# Altium footprint library SiPAP_Footprints.PcbLib: 25 footprints (part 2 of 2)
Each footprint in its own frame and in the unit in brackets; x right, y up, seen from the top. Pads: shape width x height; smd on the part's side, far side on the other; paste and mask are expansions set on the pad; w line width, h text height; cw(c..) or ccw(c..) is an arc to the next point about the centre after c.
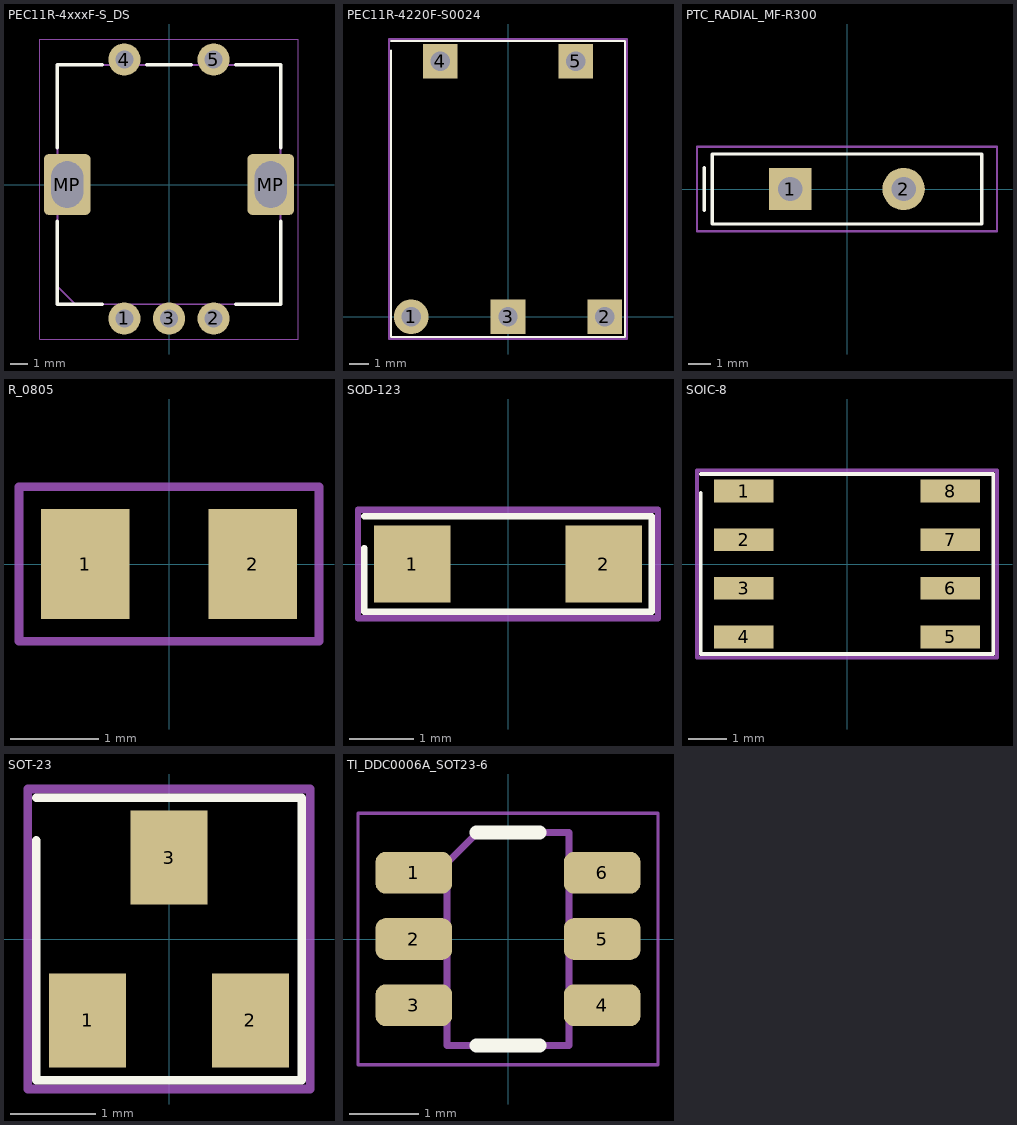
[diagram p1: the footprints below, top view; thin cyan lines are the x and y axes]

## PCBComponent_1 [mm]

## PEC11R-4xxxF-S_DS [mm] "Custom, 6 pads; custom lands, density N (nominal); from Bourns PEC11R Series 12 mm Incremental Encoder datasheet, PEC11R-4xxxF-Sxxxx recommended PCB layout, p. 2; Bourns PEC11R-4xxxF-Sxxxx PCB layout (datasheet p2). Origin = shaft centre. A-C-B 2.5mm pitch 7.5mm below, switch pins 7.0mm above, 2 plated mounting slots 1.8x2.6 (13.2 outer), pad MP = mechanical."
height 31.5
pads (7):
  round 1.8 hole 1: 1(-2.5,-7.5) 2(2.5,-7.5) 3(0,-7.5) 4(-2.5,7) 5(2.5,7)
  rrect19% 2.6x3.4 hole 1.8 slot 2.6 at 90 deg: MP(-5.7,0) MP(5.7,0)
Top Overlay:
  lines w0.2: -6.25,-2.05 -6.25,-6.7 -3.75,-6.7 ; -6.25,2.05 -6.25,6.7 -3.75,6.7 ; -1.25,6.7 1.25,6.7 ; 3.75,-6.7 6.25,-6.7 6.25,-2.05 ; 3.75,6.7 6.25,6.7 6.25,2.05
Mechanical 13:
  lines w0.1: -6.25,-5.7 -5.25,-6.7 6.25,-6.7 6.25,6.7 -6.25,6.7 -6.25,-5.7
  text ".Designator" at -5.075,-0.5 h1
Mechanical 15:
  lines w0.05: -7.25,-8.65 7.25,-8.65 7.25,8.15 -7.25,8.15 -7.25,-8.65
3D body: height 6.5, standoff 0, extent -6.25,-6.7 6.25,6.7
3D body: height 13.5, standoff 6.5, extent -3.5,-3.5 3.5,3.5
3D body: height 31.5, standoff 13.5, extent -3,-3 3,3

## PEC11R-4220F-S0024 [mm] "Bourns PEC11R-4xxxF-Sxxxx bottom view pad layout (Rev 04/26): A-C-B row 5mm pitch, switch pins 13.2mm offset, 7mm apart"
pads (5):
  round 1.8 on Top hole 1: 1(-5,0)
  rect 1.8x1.8 on Top hole 1: 2(5,0) 3(0,0) 4(-3.5,13.2) 5(3.5,13.2)
Top Overlay:
  lines w0.1: -6.05,13.75 -6.05,-1.05 6.05,-1.05 6.05,14.25 -6.05,14.25
Mechanical 15:
  lines w0.1: -6.15,-1.15 -6.15,14.35 6.15,14.35 6.15,-1.15 -6.15,-1.15

## PTC_RADIAL_MF-R300 [mm] "Bourns MF-R300 radial PPTC (datasheet p3: A 12.0 max, B 18.3 max tall, C 5.1 lead spacing, E 3.0 max, lead dia 0.81). Hole 1.1 mm."
pads (2):
  rect 1.905x1.905 hole 1.1: 1(-2.55,0)
  round 1.905 hole 1.1: 2(2.55,0)
Top Overlay:
  lines w0.152: -6.426,-0.953 -6.426,0.953 ; -6.071,-1.575 6.071,-1.575 6.071,1.575 -6.071,1.575 -6.071,-1.575
Mechanical 1:
  lines w0.102: -6.756,-1.905 6.756,-1.905 6.756,1.905 -6.756,1.905 -6.756,-1.905
3D body: height 24.8, standoff 0, extent -7.2,-1.5 7.2,1.5

## R_0805 [mm] "Standard 0805 SMD chip resistor land pattern (IPC nominal)"
pads (2):
  rect 1x1.25 smd: 1(-0.95,0) 2(0.95,0)
Mechanical 15:
  lines w0.1: -1.7,-0.875 -1.7,0.875 1.7,0.875 1.7,-0.875 -1.7,-0.875
3D body: height 1.25, standoff 0, extent -1,-0.625 1,0.625

## SOD-123 [mm] "Standard SOD-123 diode package, 2-pin (D1 reverse polarity protect)"
pads (2):
  rect 1.2x1.2 smd: 1(-1.5,0) 2(1.5,0)
Top Overlay:
  lines w0.1: -2.25,0.25 -2.25,-0.75 2.25,-0.75 2.25,0.75 -2.25,0.75
Mechanical 15:
  lines w0.1: -2.35,-0.85 -2.35,0.85 2.35,0.85 2.35,-0.85 -2.35,-0.85

## SOIC-8 [mm] "Standard SOIC-8, 1.27mm pitch, 3.9mm body (LM393 comparator)"
pads (8):
  rect 1.55x0.6 smd: 1(-2.7,1.905) 2(-2.7,0.635) 3(-2.7,-0.635) 4(-2.7,-1.905) 5(2.7,-1.905) 6(2.7,-0.635) 7(2.7,0.635) 8(2.7,1.905)
Top Overlay:
  lines w0.1: -3.825,1.855 -3.825,-2.355 3.825,-2.355 3.825,2.355 -3.825,2.355
Mechanical 15:
  lines w0.1: -3.925,-2.455 -3.925,2.455 3.925,2.455 3.925,-2.455 -3.925,-2.455
3D body: height 1.75, standoff 0, extent -1.95,-2.45 1.95,2.45
3D body: height 0.4, standoff 0, extent -3,-2.2 3,2.2

## SOT-23 [mm] "Standard SOT-23-3, 0.95mm pitch (AO3401A P-MOSFET, pin1=G pin2=S pin3=D)"
pads (3):
  rect 0.9x1.1 smd: 1(-0.95,-0.95) 2(0.95,-0.95) 3(0,0.95)
Top Overlay:
  lines w0.1: -1.55,1.15 -1.55,-1.65 1.55,-1.65 1.55,1.65 -1.55,1.65
Mechanical 15:
  lines w0.1: -1.65,-1.75 -1.65,1.75 1.65,1.75 1.65,-1.75 -1.65,-1.75
3D body: height 1.12, standoff 0, extent -1.45,-0.65 1.45,0.65

## TI_DDC0006A_SOT23-6 [mm] "Custom, 6 pads; custom lands, density N (nominal); from TI TPS54202 datasheet SLVSD26C, C (Feb 2026), DDC0006A Example Board Layout, p. 29; TI DDC0006A (SOT-23-6, 1.1 max height) land pattern per TPS54202 datasheet p29."
height 1.1
pads (6):
  rrect50% 1.1x0.6 smd: 1(-1.35,0.95) 2(-1.35,0) 3(-1.35,-0.95) 4(1.35,-0.95) 5(1.35,0) 6(1.35,0.95)
Top Overlay:
  lines w0.2: -0.45,-1.525 0.45,-1.525 ; -0.45,1.525 0.45,1.525
Mechanical 13:
  lines w0.1: -0.875,-1.525 0.875,-1.525 0.875,1.525 -0.437,1.525 -0.875,1.088 -0.875,-1.525
  text ".Designator" at -1.522,-0.15 h0.3
Mechanical 15:
  lines w0.05: -2.15,-1.8 2.15,-1.8 2.15,1.8 -2.15,1.8 -2.15,-1.8
3D body: height 1.1, standoff 0, extent -0.8,-1.45 0.8,1.45